# Altium schematic symbol library LTVS16H5.0ET5G.SchLib: 1 symbol
Pins are listed as number, name and electrical type; pins without a type are passive.

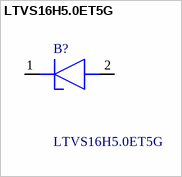
[diagram p0: symbol LTVS16H5.0ET5G]

## LTVS16H5.0ET5G
designator B?
DFN1610 ESD Protection Devices ROHS; Manufacturer_Name: LRC; Geometry.Height: 0.55mm; Manufacturer_Part_Number: LTVS16H5.0ET5G; Mouser Part Number: *; Mouser Price/Stock: *; Arrow Part Number: *; Arrow Price/Stock: *; Datasheet Link: https://www.alldatasheet.net/datasheet-pdf/pdf/1107931/LRC/LTVS16H5.0ET5G.html
footprint LTVS16H50ET5G
pins: 1 K, 2 A